# Altium schematic symbol library SK54AFL-TP.SchLib: 1 symbol
Pins are listed as number, name and electrical type; pins without a type are passive.

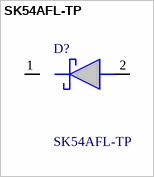
[diagram p0: symbol SK54AFL-TP]

## SK54AFL-TP
designator D?
Diode 40 V 5A Surface Mount DO-221AC (SMA-FL); Manufacturer_Name: MCC; Geometry.Height: 1.25mm; Mouser Part Number: 833-SK54AFL-TP; Mouser Price/Stock: https://www.mouser.co.uk/ProductDetail/Micro-Commercial-Components-MCC/SK54AFL-TP?qs=%2F9jDaHz9Z2gBQB3PYEbhqg%3D%3D; Manufacturer_Part_Number: SK54AFL-TP; Datasheet Link: https://mccsemi.com/pdf/Products/SK52AFL-SK5200AFL(DO-221AC).pdf
footprint SK54AFLTP
pins: 1 K, 2 A